# EAGLE library part AD8671ARMZ-REEL (library AD8671ARMZ-REEL)
Precision Low Noise, Low Input Bias Current, Single Op Amp Source: Datasheet <https://www.analog.com/AD8671/datasheet>
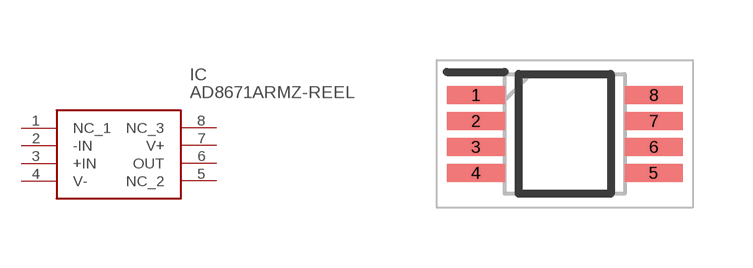
[diagram p0: symbol with the pads of SOP65P490X110-8N; footprint SOP65P490X110-8N]

Designator prefix IC

## AD8671ARMZ-REEL (Description: Precision Low Noise, Low Input Bias Current, Single Op Amp; Height: 1.1mm; Manufacturer_Name: Analog Devices; Manufacturer_Part_Number: AD8671ARMZ-REEL; Mouser_Part_Number: 584-AD8671ARMZ-R; Mouser_Price-Stock: https://www.mouser.co.uk/ProductDetail/Analog-Devices/AD8671ARMZ-REEL?qs=%2FtpEQrCGXCwLWWSTo5JWGg%3D%3D)  [SOP65P490X110-8N]
1  NC_1
2  -IN
3  +IN
4  V-
5  NC_2
6  OUT
7  V+
8  NC_3

## Footprint SOP65P490X110-8N (pad centres in mm)
(RM-8)
smd 1.45 x 0.45: 1 -2.225,0.975; 2 -2.225,0.325; 3 -2.225,-0.325; 4 -2.225,-0.975; 5 2.225,-0.975; 6 2.225,-0.325; 7 2.225,0.325; 8 2.225,0.975